# Altium footprint library ACB_PcbLib.PcbLib: 152 footprints (part 10 of 10)
Each footprint in its own frame and in the unit in brackets; x right, y up, seen from the top. Pads: shape width x height; smd on the part's side, far side on the other; paste and mask are expansions set on the pad; w line width, h text height; cw(c..) or ccw(c..) is an arc to the next point about the centre after c.
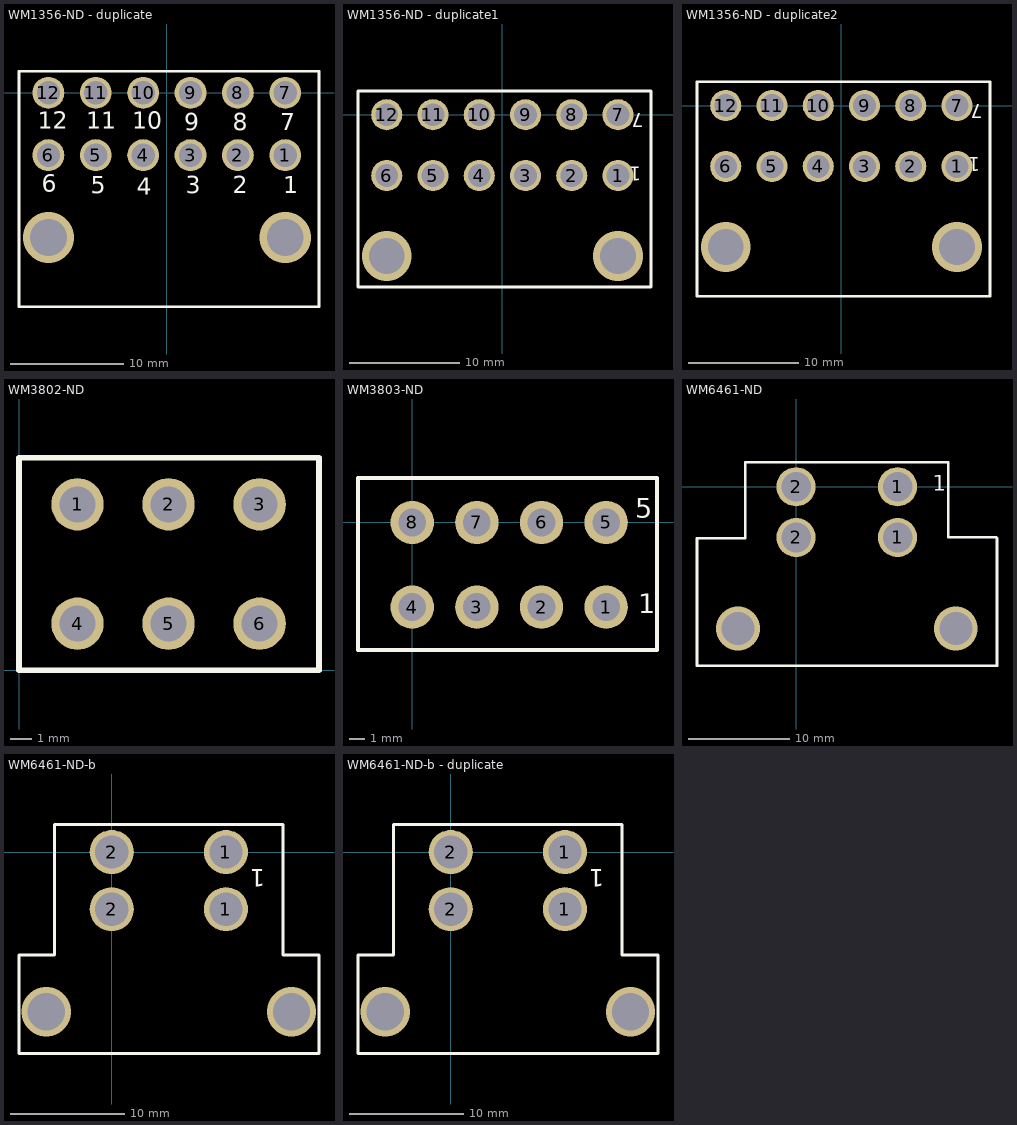
[diagram p9: the footprints below, top view; thin cyan lines are the x and y axes]

## WM1356-ND - duplicate [mil]
pads (12):
  round 111 hole 81: 1(412.5,-217) 2(247.5,-217) 3(82.5,-217) 4(-82.5,-217) 5(-247.5,-217) 6(-412.5,-217) 7(412.5,0) 8(247.5,0) 9(82.5,0) 10(-82.5,0) 11(-247.5,0) 12(-412.5,0)
via 412.5,-504 diameter 178 hole 128
via -412.5,-504 diameter 178 hole 128
Top Overlay:
  lines w10: -515,-745 -515,75 530,75 530,-745 -515,-745
  text "5" at -265,-350 h60
  text "4" at -105,-355 h60
  text "3" at 65,-350 h60
  text "2" at 230,-350 h60
  text "1" at 405,-350 h60
  text "7" at 395,-130 h60
  text "8" at 230,-130 h60
  text "9" at 60,-130 h60
  text "10" at -120,-125 h60
  text "11" at -280,-125 h60
  text "6" at -435,-345 h60
  text "12" at -450,-125 h60
3D body "WM1356-ND.stp": height 448.82, standoff -141.73, extent -519.68,-765 535.44,19.84

## WM1356-ND - duplicate1 [mil]
pads (12):
  round 111 hole 81: 1(412.5,-217) 2(247.5,-217) 3(82.5,-217) 4(-82.5,-217) 5(-247.5,-217) 6(-412.5,-217) 7(412.5,0) 8(247.5,0) 9(82.5,0) 10(-82.5,0) 11(-247.5,0) 12(-412.5,0)
via -412.5,-504 diameter 178 hole 128
via 412.5,-504 diameter 178 hole 128
Top Overlay:
  lines w10: -515,-615 -515,85 530,85 530,-615 -515,-615
  text "7" at 505,5 h50
  text "1" at 495,-185 h50
3D body "WM1356-ND.stp": height 448.82, standoff -141.73, extent -519.68,-765 535.44,19.84

## WM1356-ND - duplicate2 [mil]
pads (12):
  round 111 hole 81: 1(412.5,-217) 2(247.5,-217) 3(82.5,-217) 4(-82.5,-217) 5(-247.5,-217) 6(-412.5,-217) 7(412.5,0) 8(247.5,0) 9(82.5,0) 10(-82.5,0) 11(-247.5,0) 12(-412.5,0)
via -412.5,-504 diameter 178 hole 128
via 412.5,-504 diameter 178 hole 128
Top Overlay:
  lines w10: -515,-680 530,-680 530,85 -515,85 -515,-680
  text "1" at 495,-185 h50
  text "7" at 505,5 h50
3D body "WM1356-ND.stp": height 448.82, standoff -141.73, extent -519.68,-765 535.44,19.84

## WM3802-ND [mm]
pads (6):
  round 2.419 hole 1.657: 1(2.7,7.65) 2(6.9,7.65) 3(11.1,7.65) 4(2.7,2.15) 5(6.9,2.15) 6(11.1,2.15)
Top Overlay:
  lines w0.254: 13.8,0 0,0 0,9.8 13.8,9.8 ; 13.843,0 13.843,9.8
3D body "039281063.stp": height 12.8, standoff -3.5, extent -0.4,-0.993 14.2,10.007

## WM3803-ND [mm]
pads (8):
  round 2.819 hole 1.8: 1(12.6,-5.5) 2(8.4,-5.5) 3(4.2,-5.5) 4(0,-5.5) 5(12.6,0) 6(8.4,0) 7(4.2,0) 8(0,0)
Top Overlay:
  lines w0.254: -3.525,-8.3 15.9,-8.3 15.9,2.9 -3.525,2.9 -3.525,-8.3
  text "1" at 14.7,-5.9 h1.27
  text "5" at 14.5,0.3 h1.27
3D body "039281083.stp": height 12.8, standoff -3.5, extent -3.225,-7.925 15.575,3.075

## WM6461-ND [mil]
pads (4):
  round 152 hole 115: 1(394,-197) 1(394,0) 2(0,-197) 2(0,0)
via 620,-551 diameter 170 hole 128
via -226,-551 diameter 170 hole 128
Top Overlay:
  lines w10: -385,-695 -385,-200 -196.85,-200 -196.85,95 590.55,95 590.55,-196.85 776.85,-196.85 780,-200 780,-695 -385,-695
  text "1" at 530,-15 h60
3D body "428202213.stp": height 554.96, standoff -135.98, extent -273.9,-1080.51 663.9,65.16

## WM6461-ND-b [mil]
pads (4):
  round 152 hole 115: 1(394,-197) 1(394,0) 2(0,-197) 2(0,0)
via 620,-551 diameter 170 hole 128
via -226,-551 diameter 170 hole 128
Top Overlay:
  lines w10: -320,-695 -320,-355 -196.85,-355 -196.85,95 590.55,95 590.55,-355 715,-355 715,-695 -320,-695
  text "1" at 530,-60 h60
3D body "428202213.stp": height 554.96, standoff -135.98, extent -273.9,-1080.51 663.9,65.16

## WM6461-ND-b - duplicate [mil]
pads (4):
  round 152 hole 115: 1(394,-197) 1(394,0) 2(0,-197) 2(0,0)
via -226,-551 diameter 170 hole 128
via 620,-551 diameter 170 hole 128
Top Overlay:
  lines w10: -320,-695 715,-695 715,-355 590.55,-355 590.55,95 -196.85,95 -196.85,-355 -320,-355 -320,-695
  text "1" at 530,-60 h60
3D body "428202213.stp": height 554.96, standoff -135.98, extent -273.9,-1080.51 663.9,65.16